# Altium schematic symbol library INA181A3IDBVR.SchLib: 1 symbol
Pins are listed as number, name and electrical type; pins without a type are passive.

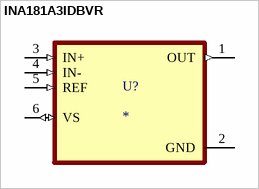
[diagram p0: symbol INA181A3IDBVR]

## INA181A3IDBVR
designator U?
26-VÂ bi-directionalÂ 350-kHz current-sense amplifier; MF: Texas Instruments; MP: INA181A3IDBVR; SnapEDA_Link: https://www.snapeda.com/parts/INA181A3IDBVR/Texas+Instruments/view-part/?ref=snap; Package: SOT-23-6 Texas Instruments; Value: *; Check_prices: https://www.snapeda.com/parts/INA181A3IDBVR/Texas+Instruments/view-part/?ref=eda
footprint SOT95P280X145-6N
pins: 1 OUT (out), 2 GND (power), 3 IN+ (in), 4 IN- (in), 5 REF (in), 6 VS (io)